# Altium schematic symbol library ELXS251VSN561MR25S.SchLib: 1 symbol
Pins are listed as number, name and electrical type; pins without a type are passive.

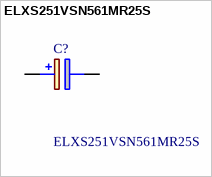
[diagram p0: symbol ELXS251VSN561MR25S]

## ELXS251VSN561MR25S
designator C?
Nippon Chemi-Con 560uF 250 V dc Aluminium Electrolytic Capacitor, LXS Series 5000h 30 (Dia.) x 25mm; Geometry.Height: 27.5mm; Mouser Part Number: 661-ELXS251VSN561MR2; Mouser Price/Stock: https://www.mouser.com/Search/Refine.aspx?Keyword=661-ELXS251VSN561MR2; Manufacturer_Name: Chemi-Con; Manufacturer_Part_Number: ELXS251VSN561MR25S; Datasheet Link: http://www.mouser.com/datasheet/2/420/al-lxslug-e-140701-515431.pdf
footprint CAPPRD1000W180D3050H2750
pins: 1 +, 2 -